# Altium footprint library ATX6-D-RA.PcbLib: 1 footprints
Each footprint in its own frame and in the unit in brackets; x right, y up, seen from the top. Pads: shape width x height; smd on the part's side, far side on the other; paste and mask are expansions set on the pad; w line width, h text height; cw(c..) or ccw(c..) is an arc to the next point about the centre after c.
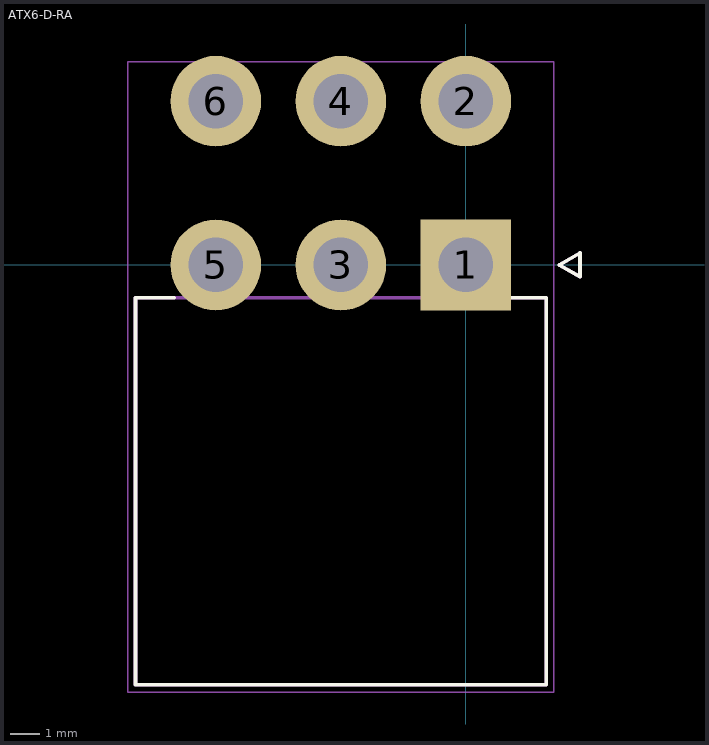
[diagram p0: the footprint, top view; thin cyan lines are the x and y axes]

## ATX6-D-RA [mil] "ATX6-D-RA"
pads (6):
  rect 120x120 hole 72: 1(0,0)
  round 120 hole 72: 2(0,216.54) 3(-165.35,0) 4(-165.35,216.54) 5(-330.71,0) 6(-330.71,216.54)
Top Overlay:
  lines w5: -385.63,-43.31 -437.01,-43.31 -437.01,-555.12 106.3,-555.12 106.3,-43.31 54.92,-43.31 ; 123.43,0 150.98,-15.75 150.98,15.75 123.43,0
Mechanical 13:
  lines w5: -437.01,-555.12 106.3,-555.12 ; -437.01,-555.12 106.3,-555.12 ; -437.01,-555.12 -437.01,-43.31 106.3,-43.31 106.3,-555.12 ; 123.43,0 150.98,-15.75 150.98,15.75 123.43,0
Mechanical 15:
  lines w1.97: -446.85,-564.96 116.14,-564.96 116.14,268.7 -446.85,268.7 -446.85,-564.96
3D body "ATX6-D-RA.stp": height 448.03, standoff -134.65, extent -445,-556.36 117.99,236.36